# Altium footprint library CAY16.PcbLib: 1 footprints
Each footprint in its own frame and in the unit in brackets; x right, y up, seen from the top. Pads: shape width x height; smd on the part's side, far side on the other; paste and mask are expansions set on the pad; w line width, h text height; cw(c..) or ccw(c..) is an arc to the next point about the centre after c.
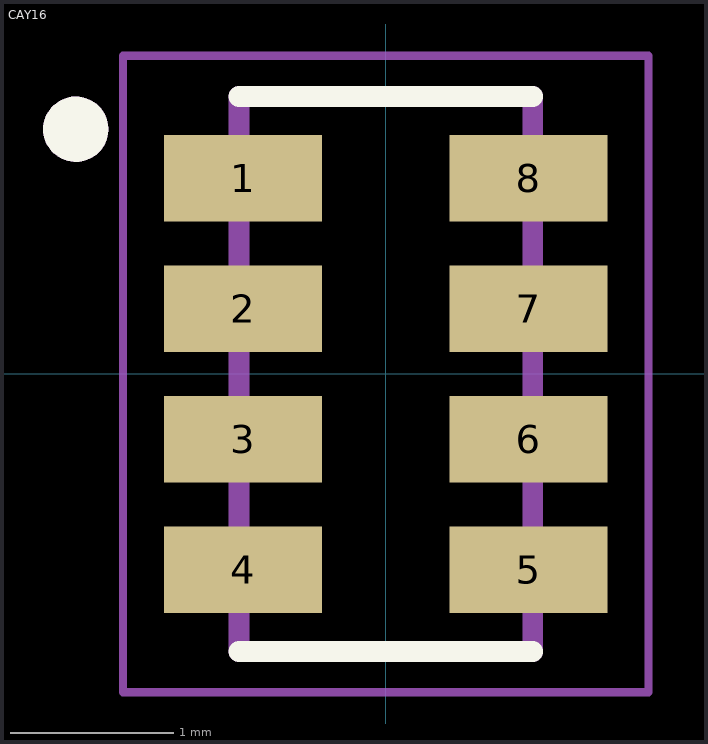
[diagram p0: the footprint, top view; thin cyan lines are the x and y axes]

## CAY16 [mm] "RESCAF80P320X160X60-8N"
pads (8):
  rect 0.97x0.53 smd: 1(-0.875,1.2) 2(-0.875,0.4) 3(-0.875,-0.4) 4(-0.875,-1.2) 5(0.875,-1.2) 6(0.875,-0.4) 7(0.875,0.4) 8(0.875,1.2)
Top Overlay:
  circle w0.2: c-1.9,1.5 r0.1
  lines w0.127: -0.9,-1.7 0.9,-1.7 ; -0.9,1.7 0.9,1.7
Mechanical 4 (Mech13):
  circle w0.2: c-1.9,1.5 r0.1
  circle w0.2: c-1.9,1.5 r0.1
  lines w0.127: -0.9,-1.7 -0.9,1.7 ; -0.9,-1.7 0.9,-1.7 ; -0.9,-1.7 -0.9,1.7 ; -0.9,-1.7 0.9,-1.7 ; -0.9,1.7 0.9,1.7 ; -0.9,1.7 0.9,1.7 ; 0.9,-1.7 0.9,1.7 ; 0.9,-1.7 0.9,1.7
Mechanical 16:
  lines w0.05: -1.61,-1.95 1.61,-1.95 1.61,1.95 -1.61,1.95 -1.61,-1.95
3D body "CAY16.STEP": height 0.6, standoff 0, extent -0.8,-1.6 0.8,1.6